# Altium footprint library WE-CMBNC.PcbLib: 45 footprints (part 2 of 3)
Each footprint in its own frame and in the unit in brackets; x right, y up, seen from the top. Pads: shape width x height; smd on the part's side, far side on the other; paste and mask are expansions set on the pad; w line width, h text height; cw(c..) or ccw(c..) is an arc to the next point about the centre after c.
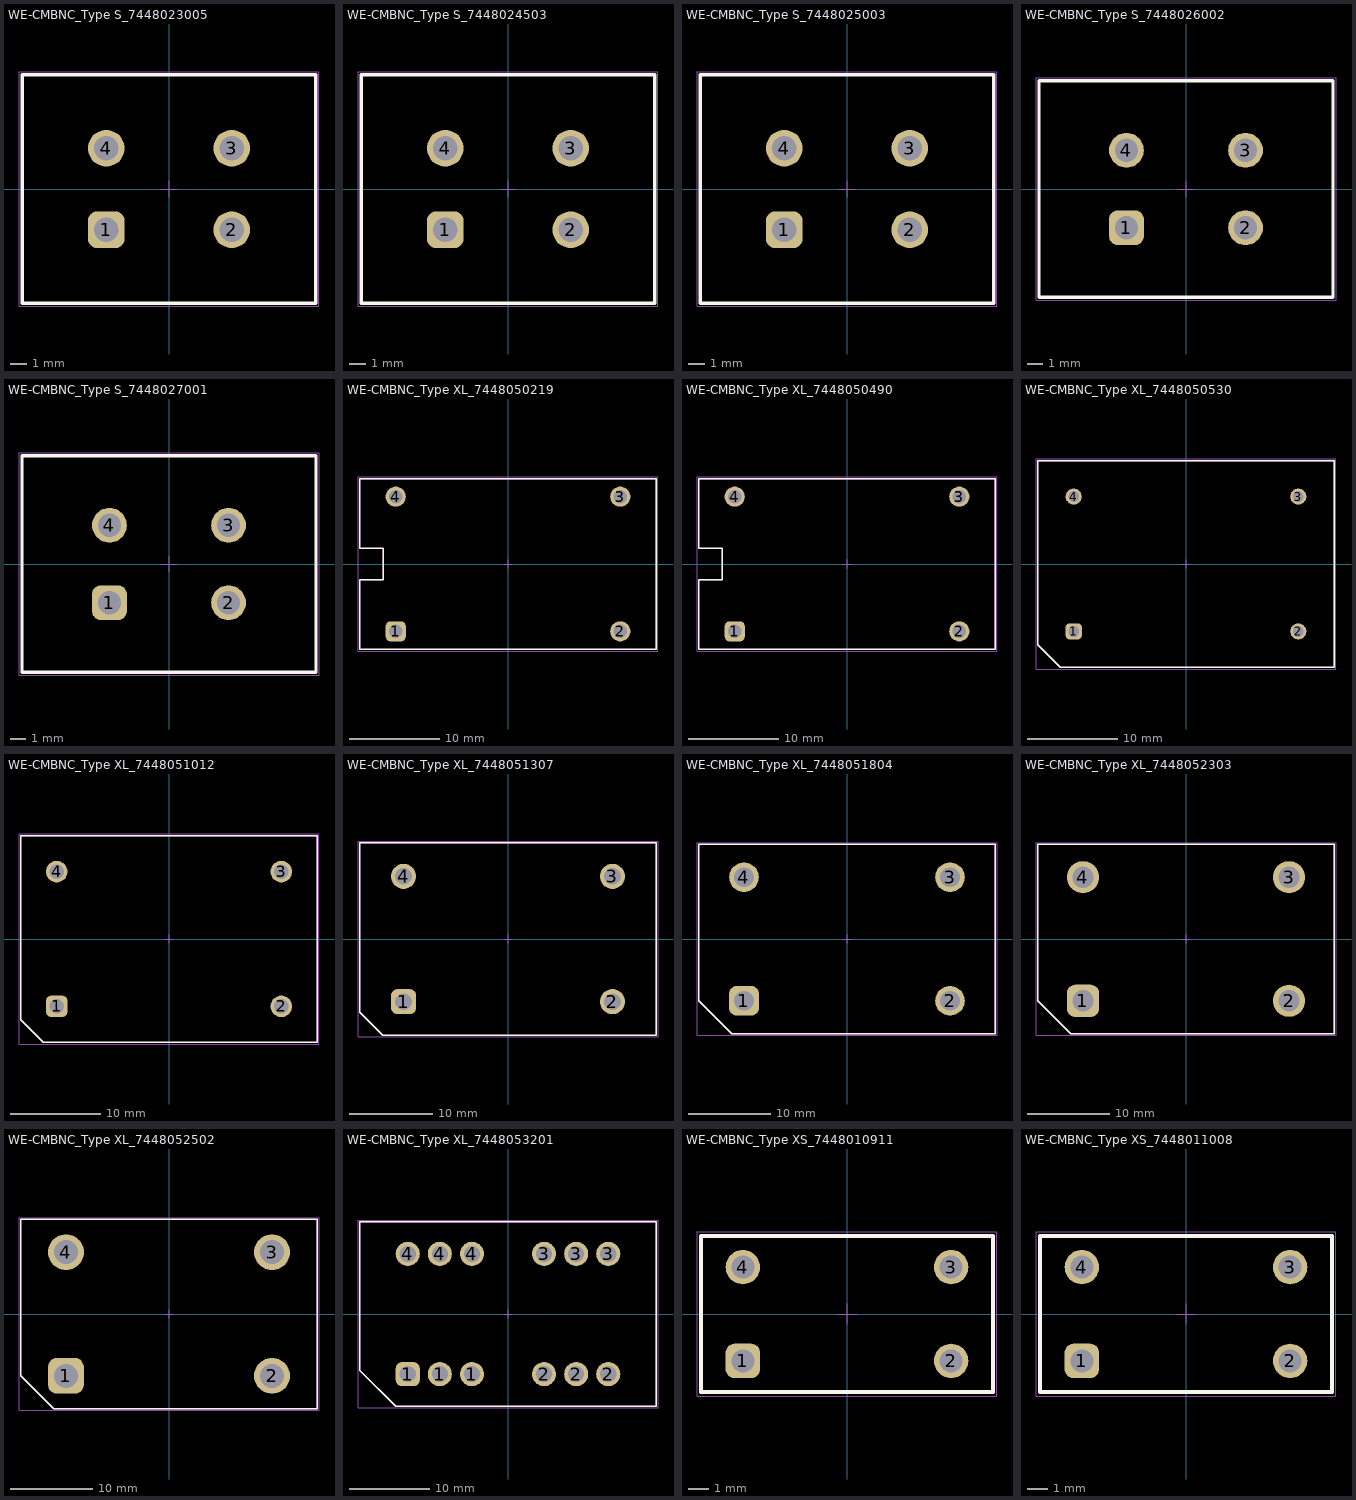
[diagram p1: the footprints below, top view; thin cyan lines are the x and y axes]

## WE-CMBNC_Type S_7448023005 [mm] "THT Common Mode Power Line Choke, 4 leads, body 18x14mm"
height 22
pads (4):
  rrect50% 2.25x2.25 hole 1.5: 1(-3.85,-2.5)
  round 2.25 hole 1.5: 2(3.85,-2.5) 3(3.85,2.5) 4(-3.85,2.5)
Top Overlay:
  lines w0.2: -9,-7 9,-7 9,7 -9,7 -9,-7
Top Designator:
  text ".Designator" at -7.498,-0.5 h1.5
Top Component Outline:
  lines w0.1: -9,-7 9,-7 9,7 -9,7 -9,-7
Top Courtyard:
  lines w0.05: -9.2,-7.2 9.2,-7.2 9.2,7.2 -9.2,7.2 -9.2,-7.2
Top Component Center:
  lines w0.05: -0.5,0 0.5,0 ; 0,-0.5 0,0.5
3D body "7448023005.stp": height 20.41, standoff -3.4, extent -7.947,-6.926 7.947,6.707

## WE-CMBNC_Type S_7448024503 [mm] "THT Common Mode Power Line Choke, 4 leads, body 18x14mm"
height 22
pads (4):
  rrect50% 2.25x2.25 hole 1.5: 1(-3.85,-2.5)
  round 2.25 hole 1.5: 2(3.85,-2.5) 3(3.85,2.5) 4(-3.85,2.5)
Top Overlay:
  lines w0.2: -9,-7 -9,7 9,7 9,-7 -9,-7
Top Designator:
  text ".Designator" at -7.498,-0.5 h1.5
Top Component Outline:
  lines w0.1: -9,-7 -9,7 9,7 9,-7 -9,-7
Top Courtyard:
  lines w0.05: -9.2,-7.2 -9.2,7.2 9.2,7.2 9.2,-7.2 -9.2,-7.2
Top Component Center:
  lines w0.05: -0.5,0 0.5,0 ; 0,-0.5 0,0.5
3D body "7448024503.stp": height 20.41, standoff -3.4, extent -8.104,-6.924 8.104,6.708

## WE-CMBNC_Type S_7448025003 [mm] "THT Common Mode Power Line Choke, 4 leads, body 18x14mm"
height 22
pads (4):
  rrect50% 2.25x2.25 hole 1.5: 1(-3.85,-2.5)
  round 2.25 hole 1.5: 2(3.85,-2.5) 3(3.85,2.5) 4(-3.85,2.5)
Top Overlay:
  lines w0.2: -9,-7 -9,7 9,7 9,-7 -9,-7
Top Designator:
  text ".Designator" at -7.498,-0.5 h1.5
Top Component Outline:
  lines w0.1: -9,-7 -9,7 9,7 9,-7 -9,-7
Top Courtyard:
  lines w0.05: -9.2,-7.2 -9.2,7.2 9.2,7.2 9.2,-7.2 -9.2,-7.2
Top Component Center:
  lines w0.05: -0.5,0 0.5,0 ; 0,-0.5 0,0.5
3D body "7448025003.stp": height 20.41, standoff -3.4, extent -8.228,-6.926 8.228,6.707

## WE-CMBNC_Type S_7448026002 [mm] "THT Common Mode Power Line Choke, 4 leads, body 19x14mm"
height 22
pads (4):
  rrect50% 2.25x2.25 hole 1.5: 1(-3.85,-2.5)
  round 2.25 hole 1.5: 2(3.85,-2.5) 3(3.85,2.5) 4(-3.85,2.5)
Top Overlay:
  lines w0.2: -9.5,-7 9.5,-7 9.5,7 -9.5,7 -9.5,-7
Top Designator:
  text ".Designator" at -7.498,-0.5 h1.5
Top Component Outline:
  lines w0.1: -9.5,-7 9.5,-7 9.5,7 -9.5,7 -9.5,-7
Top Courtyard:
  lines w0.05: -9.7,-7.2 9.7,-7.2 9.7,7.2 -9.7,7.2 -9.7,-7.2
Top Component Center:
  lines w0.05: -0.5,0 0.5,0 ; 0,-0.5 0,0.5
3D body "7448026002.stp": height 20.41, standoff -3.4, extent -8.356,-7.151 8.356,6.747

## WE-CMBNC_Type S_7448027001 [mm] "THT Common Mode Power Line Choke, 4 leads, body 19x14mm"
height 22
pads (4):
  rrect50% 2.25x2.25 hole 1.5: 1(-3.85,-2.5)
  round 2.25 hole 1.5: 2(3.85,-2.5) 3(3.85,2.5) 4(-3.85,2.5)
Top Overlay:
  lines w0.2: -9.5,-7 -9.5,7 9.5,7 9.5,-7 -9.5,-7
Top Designator:
  text ".Designator" at -7.498,-0.5 h1.5
Top Component Outline:
  lines w0.1: -9.5,-7 -9.5,7 9.5,7 9.5,-7 -9.5,-7
Top Courtyard:
  lines w0.05: -9.7,-7.2 -9.7,7.2 9.7,7.2 9.7,-7.2 -9.7,-7.2
Top Component Center:
  lines w0.05: -0.5,0 0.5,0 ; 0,-0.5 0,0.5
3D body "7448027001.stp": height 20.41, standoff -4.9, extent -8.342,-7.149 8.342,6.71

## WE-CMBNC_Type XL_7448050219 [mm] "THT Common Mode Power Line Choke, 4 leads, body 33x19mm"
height 39
pads (4):
  rrect50% 2.25x2.25 hole 1.5: 1(-12.5,-7.5)
  round 2.25 hole 1.5: 2(12.5,-7.5) 3(12.5,7.5) 4(-12.5,7.5)
Top Overlay:
  lines w0.2: -16.5,-9.5 -16.5,-1.75 -13.9,-1.75 -13.9,1.75 -16.5,1.75 -16.5,9.5 16.5,9.5 16.5,-9.5 -16.5,-9.5
Top Designator:
  text ".Designator" at -7.498,-0.5 h1.5
Top Component Outline:
  lines w0.1: -16.5,-9.5 16.5,-9.5 16.5,9.5 -16.5,9.5 -16.5,1.75 -13.9,1.75 -13.9,-1.75 -16.5,-1.75 -16.5,-9.5
Top Courtyard:
  lines w0.05: -16.7,-9.7 16.7,-9.7 16.7,9.7 -16.7,9.7 -16.7,-9.7
Top Component Center:
  lines w0.05: -0.5,0 0.5,0 ; 0,-0.5 0,0.5
3D body "7448050219.stp": height 35.7, standoff -4.91, extent -15.651,-9.2 15.65,9.2

## WE-CMBNC_Type XL_7448050490 [mm] "THT Common Mode Power Line Choke, 4 leads, body 33x19mm"
height 39
pads (4):
  rrect50% 2.25x2.25 hole 1.5: 1(-12.5,-7.5)
  round 2.25 hole 1.5: 2(12.5,-7.5) 3(12.5,7.5) 4(-12.5,7.5)
Top Overlay:
  lines w0.2: -16.5,-9.5 16.5,-9.5 16.5,9.5 -16.5,9.5 -16.5,1.75 -13.9,1.75 -13.9,-1.75 -16.5,-1.75 -16.5,-9.5
Top Designator:
  text ".Designator" at -7.498,-0.5 h1.5
Top Component Outline:
  lines w0.1: -16.5,-9.5 -16.5,-1.75 -13.9,-1.75 -13.9,1.75 -16.5,1.75 -16.5,9.5 16.5,9.5 16.5,-9.5 -16.5,-9.5
Top Courtyard:
  lines w0.05: -16.7,-9.7 -16.7,9.7 16.7,9.7 16.7,-9.7 -16.7,-9.7
Top Component Center:
  lines w0.05: -0.5,0 0.5,0 ; 0,-0.5 0,0.5
3D body "7448050490.stp": height 35.76, standoff -4.9, extent -16.243,-9.676 16.242,9.2

## WE-CMBNC_Type XL_7448050530 [mm] "THT Common Mode Power Line Choke, 4 leads, body 33x23mm"
height 33
pads (4):
  rrect50% 1.8x1.8 hole 1.2: 1(-12.5,-7.5)
  round 1.8 hole 1.2: 2(12.5,-7.5) 3(12.5,7.5) 4(-12.5,7.5)
Top Overlay:
  lines w0.2: -16.5,-9 -16.5,-1.75 -16.5,1.75 -16.5,11.5 16.5,11.5 16.5,-11.5 -14,-11.5 -16.5,-9
Top Designator:
  text ".Designator" at -7.498,-0.5 h1.5
Top Component Outline:
  lines w0.1: -16.5,-9 -14,-11.5 16.5,-11.5 16.5,11.5 -16.5,11.5 -16.5,1.75 -16.5,-1.75 -16.5,-9
Top Courtyard:
  lines w0.05: -16.7,-11.7 16.7,-11.7 16.7,11.7 -16.7,11.7 -16.7,-11.7
Top Component Center:
  lines w0.05: -0.5,0 0.5,0 ; 0,-0.5 0,0.5
3D body "7448050530.stp": height 32, standoff -4.9, extent -15.069,-10.3 15.069,10.3

## WE-CMBNC_Type XL_7448051012 [mm] "THT Common Mode Power Line Choke, 4 leads, body 34x23mm"
height 33
pads (4):
  rrect50% 2.4x2.4 hole 1.6: 1(-12.5,-7.5)
  round 2.4 hole 1.6: 2(12.5,-7.5) 3(12.5,7.5) 4(-12.5,7.5)
Top Overlay:
  lines w0.2: -16.5,-9 -14,-11.5 16.5,-11.5 16.5,11.5 -16.5,11.5 -16.5,-9
Top Designator:
  text ".Designator" at -7.498,-0.5 h1.5
Top Component Outline:
  lines w0.1: -16.5,-9 -14,-11.5 16.5,-11.5 16.5,11.5 -16.5,11.5 -16.5,-9
Top Courtyard:
  lines w0.05: -16.7,-11.7 -16.7,11.7 16.7,11.7 16.7,-11.7 -16.7,-11.7
Top Component Center:
  lines w0.05: -0.5,0 0.5,0 ; 0,-0.5 0,0.5
3D body "7448051012.stp": height 32.67, standoff -4.9, extent -15.315,-10.3 15.315,10.3

## WE-CMBNC_Type XL_7448051307 [mm] "THT Common Mode Power Line Choke, 4 leads, body 36x23mm"
height 35
pads (4):
  rrect50% 3x3 hole 2: 1(-12.5,-7.5)
  round 3 hole 2: 2(12.5,-7.5) 3(12.5,7.5) 4(-12.5,7.5)
Top Overlay:
  lines w0.2: -17.75,-8.75 -15,-11.5 17.75,-11.5 17.75,11.5 -17.75,11.5 -17.75,-8.75
Top Designator:
  text ".Designator" at -7.498,-0.5 h1.5
Top Component Outline:
  lines w0.1: -17.75,-8.75 -17.75,11.5 17.75,11.5 17.75,-11.5 -15,-11.5 -17.75,-8.75
Top Courtyard:
  lines w0.05: -17.95,-11.7 -17.95,11.7 17.95,11.7 17.95,-11.7 -17.95,-11.7
Top Component Center:
  lines w0.05: -0.5,0 0.5,0 ; 0,-0.5 0,0.5
3D body "7448051307.stp": height 32.43, standoff -4.9, extent -15.61,-10.3 15.61,10.3

## WE-CMBNC_Type XL_7448051804 [mm] "THT Common Mode Power Line Choke, 4 leads, body 36x23mm"
height 34
pads (4):
  rrect50% 3.6x3.6 hole 2.4: 1(-12.5,-7.5)
  round 3.6 hole 2.4: 2(12.5,-7.5) 3(12.5,7.5) 4(-12.5,7.5)
Top Overlay:
  lines w0.2: -18,-7.5 -14,-11.5 18,-11.5 18,11.5 -18,11.5 -18,-7.5
Top Designator:
  text ".Designator" at -7.498,-0.5 h1.5
Top Component Outline:
  lines w0.1: -18,-7.5 -18,11.5 18,11.5 18,-11.5 -14,-11.5 -18,-7.5
Top Courtyard:
  lines w0.05: -18.2,-11.7 -18.2,11.7 18.2,11.7 18.2,-11.7 -18.2,-11.7
Top Component Center:
  lines w0.05: -0.5,0 0.5,0 ; 0,-0.5 0,0.5
3D body "7448051804.stp": height 31.75, standoff -4.9, extent -18.026,-10.3 18.026,10.389

## WE-CMBNC_Type XL_7448052303 [mm] "THT Common Mode Power Line Choke, 4 leads, body 36x23mm"
height 33
pads (4):
  rrect50% 3.9x3.9 hole 2.6: 1(-12.5,-7.5)
  round 3.9 hole 2.6: 2(12.5,-7.5) 3(12.5,7.5) 4(-12.5,7.5)
Top Overlay:
  lines w0.2: -18,-7.5 -14,-11.5 18,-11.5 18,11.5 -18,11.5 -18,-7.5
Top Designator:
  text ".Designator" at -7.498,-0.5 h1.5
Top Component Outline:
  lines w0.1: -18,-7.5 -18,11.5 18,11.5 18,-11.5 -14,-11.5 -18,-7.5
Top Courtyard:
  lines w0.05: -18.2,-11.7 -18.2,11.7 18.2,11.7 18.2,-11.7 -18.2,-11.7
Top Component Center:
  lines w0.05: -0.5,0 0.5,0 ; 0,-0.5 0,0.5
3D body "7448052303.stp": height 31.5, standoff -4.9, extent -16.063,-10.3 16.063,10.3

## WE-CMBNC_Type XL_7448052502 [mm] "THT Common Mode Power Line Choke, 4 leads, body 36x23mm"
height 34
pads (4):
  rrect50% 4.35x4.35 hole 2.9: 1(-12.5,-7.5)
  round 4.35 hole 2.9: 2(12.5,-7.5) 3(12.5,7.5) 4(-12.5,7.5)
Top Overlay:
  lines w0.2: -18,-7.5 -14,-11.5 18,-11.5 18,11.5 -18,11.5 -18,-7.5
Top Designator:
  text ".Designator" at -7.498,-0.5 h1.5
Top Component Outline:
  lines w0.1: -18,-7.5 -18,11.5 18,11.5 18,-11.5 -14,-11.5 -18,-7.5
Top Courtyard:
  lines w0.05: -18.2,-11.7 -18.2,11.7 18.2,11.7 18.2,-11.7 -18.2,-11.7
Top Component Center:
  lines w0.05: -0.5,0 0.5,0 ; 0,-0.5 0,0.5
3D body "7448052502.stp": height 30.98, standoff -4.9, extent -16.064,-10.3 16.064,10.3

## WE-CMBNC_Type XL_7448053201 [mm] "THT Common Mode Power Line Choke, 12 leads, body 37x23mm"
height 34
pads (12):
  rrect50% 3x3 hole 2: 1(-12.5,-7.5)
  round 3 hole 2: 1(-8.5,-7.5) 1(-4.5,-7.5) 2(4.5,-7.5) 2(8.5,-7.5) 2(12.5,-7.5) 3(4.5,7.5) 3(8.5,7.5) 3(12.5,7.5) 4(-12.5,7.5) 4(-8.5,7.5) 4(-4.5,7.5)
Top Overlay:
  lines w0.2: -18.5,-7 -18.5,-1.75 -18.5,2.75 -18.5,11.5 18.5,11.5 18.5,-11.5 -14,-11.5 -18.5,-7
Top Designator:
  text ".Designator" at -7.498,-0.5 h1.5
Top Component Outline:
  lines w0.1: -18.5,-7 -14,-11.5 18.5,-11.5 18.5,11.5 -18.5,11.5 -18.5,2.75 -18.5,-1.75 -18.5,-7
Top Courtyard:
  lines w0.05: -18.7,-11.7 -18.7,11.7 18.7,11.7 18.7,-11.7 -18.7,-11.7
Top Component Center:
  lines w0.05: -0.5,0 0.5,0 ; 0,-0.5 0,0.5
3D body "7448053201.stp": height 30.81, standoff -4.9, extent -15.77,-10.3 15.77,10.3

## WE-CMBNC_Type XS_7448010911 [mm] "THT Common Mode Power Line Choke, 4 leads, body 14x7.5mm"
height 16
pads (4):
  rrect50% 1.65x1.65 hole 1.1: 1(-5,-2.25)
  round 1.65 hole 1.1: 2(5,-2.25) 3(5,2.25) 4(-5,2.25)
Top Overlay:
  lines w0.2: -7,-3.75 7,-3.75 7,3.75 -7,3.75 -7,-3.75
Top Designator:
  text ".Designator" at -7.498,-0.5 h1.5
Top Component Outline:
  lines w0.1: -7,-3.75 -7,3.75 7,3.75 7,-3.75 -7,-3.75
Top Courtyard:
  lines w0.05: -7.2,-3.95 7.2,-3.95 7.2,3.95 -7.2,3.95 -7.2,-3.95
Top Component Center:
  lines w0.05: -0.5,0 0.5,0 ; 0,-0.5 0,0.5
3D body "7448010911.stp": height 14.66, standoff -2.95, extent -6.239,-3.5 6.238,3.5

## WE-CMBNC_Type XS_7448011008 [mm] "THT Common Mode Power Line Choke, 4 leads, body 14x7.5mm"
height 16
pads (4):
  rrect50% 1.65x1.65 hole 1.1: 1(-5,-2.25)
  round 1.65 hole 1.1: 2(5,-2.25) 3(5,2.25) 4(-5,2.25)
Top Overlay:
  lines w0.2: -7,-3.75 -7,3.75 7,3.75 7,-3.75 -7,-3.75
Top Designator:
  text ".Designator" at -7.498,-0.5 h1.5
Top Component Outline:
  lines w0.1: -7,-3.75 7,-3.75 7,3.75 -7,3.75 -7,-3.75
Top Courtyard:
  lines w0.05: -7.2,-3.95 -7.2,3.95 7.2,3.95 7.2,-3.95 -7.2,-3.95
Top Component Center:
  lines w0.05: -0.5,0 0.5,0 ; 0,-0.5 0,0.5
3D body "7448011008.stp": height 14.66, standoff -2.95, extent -6.262,-3.5 6.261,3.5